# Altium schematic symbol library TPS4HC120BQDGQRQ1.SchLib: 1 symbol
Pins are listed as number, name and electrical type; pins without a type are passive.

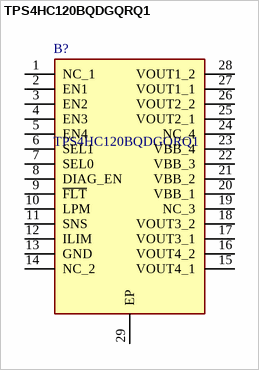
[diagram p0: symbol TPS4HC120BQDGQRQ1]

## TPS4HC120BQDGQRQ1
designator B?
Power Switch ICs - Power Distribution Automotive, four-channel 120mohm smart high-side switch with low power mode; Manufacturer_Name: Texas Instruments; Geometry.Height: 1.1mm; Manufacturer_Part_Number: TPS4HC120BQDGQRQ1; Mouser Part Number: *; Mouser Price/Stock: *; Arrow Part Number: *; Arrow Price/Stock: *; Datasheet Link: https://www.ti.com/lit/ds/symlink/tps4hc120-q1.pdf
footprint SOP50P490X110-29N
pins: 1 NC_1, 2 EN1, 3 EN2, 4 EN3, 5 EN4, 6 SEL1, 7 SEL0, 8 DIAG_EN, 9 ~{FLT}, 10 LPM, 11 SNS, 12 ILIM, 13 GND, 14 NC_2, 15 VOUT4_1, 16 VOUT4_2, 17 VOUT3_1, 18 VOUT3_2, 19 NC_3, 20 VBB_1, 21 VBB_2, 22 VBB_3, 23 VBB_4, 24 NC_4, 25 VOUT2_1, 26 VOUT2_2, 27 VOUT1_1, 28 VOUT1_2, 29 EP